# Altium footprint library TSM-104-01-L-MT.PcbLib: 1 footprints
Each footprint in its own frame and in the unit in brackets; x right, y up, seen from the top. Pads: shape width x height; smd on the part's side, far side on the other; paste and mask are expansions set on the pad; w line width, h text height; cw(c..) or ccw(c..) is an arc to the next point about the centre after c.
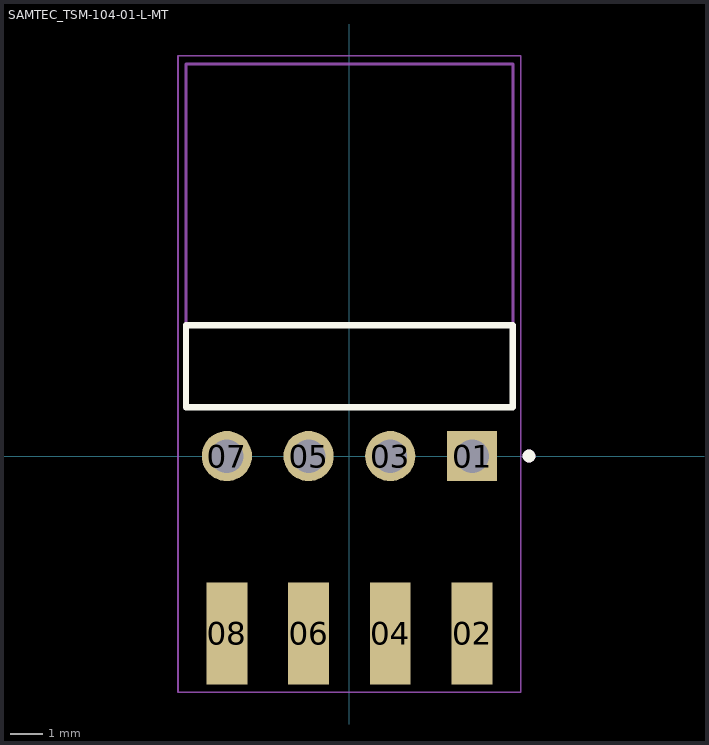
[diagram p0: the footprint, top view; thin cyan lines are the x and y axes]

## SAMTEC_TSM-104-01-L-MT [mm]
pads (8):
  rect 1.56x1.56 / inner round 1.56 / far side rect 1.56x1.56 hole 1.04: 01(3.81,0)
  rect 1.27x3.175 smd: 02(3.81,-5.511) 04(1.27,-5.511) 06(-1.27,-5.511) 08(-3.81,-5.511)
  round 1.56 hole 1.04: 03(1.27,0) 05(-1.27,0) 07(-3.81,0)
Top Overlay:
  circle w0.2: c5.58,0 r0.1
  lines w0.2: -5.08,1.52 5.08,1.52 5.08,4.06 -5.08,4.06 -5.08,1.52
Top Paste:
  region: -2.73,-1.08 -4.89,-1.08 -4.89,1.08 -2.73,1.08
  region: -0.19,-1.08 -2.35,-1.08 -2.35,1.08 -0.19,1.08
  region: 2.35,-1.08 0.19,-1.08 0.19,1.08 2.35,1.08
  region: 4.89,-1.08 2.73,-1.08 2.73,1.08 4.89,1.08
Mechanical 13:
  circle w0.2: c5.58,0 r0.1
  lines w0.1: -5.08,4.06 -5.08,1.52 5.08,1.52 5.08,4.06 ; -5.08,4.06 5.08,4.06 ; -5.08,4.06 -5.08,12.19 5.08,12.19 5.08,4.06
Mechanical 15:
  lines w0.05: -5.33,-7.34 5.33,-7.34 5.33,12.44 -5.33,12.44 -5.33,-7.34